# Altium schematic symbol library GSD9605YB-3V2800.SCHLIB: 1 symbol
Pins are listed as number, name and electrical type; pins without a type are passive.

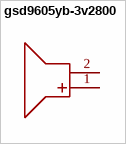
[diagram p0: symbol gsd9605yb-3v2800]

## gsd9605yb-3v2800
designator BUZZER??  (value not drawn)
驱动方式:有源(内含驱动线路);构造类型:电磁式;额定电压:3.3V;频率:2.7kHz;声压(SPL):80dB;; Manufacturer: INGHAi(赢海); AddInBom: yes; ModelId: d9f071f9511e4f7795b1f85db8085480; ModelName: BUZ-SMD_L9.6-W9.6-H5.0; ModelTransform: 393.7,377.952,0,270,0,0,0,0,0; Voltage Rating: 3.3V; Voltage - Supply: 2V~5V; Value: 2.7kHz; Current Consumption: 30mA; Sound Pressure Level(SPL): 80dB; Symbol: GSD9605YB-3V2800; LCSC Part Name: 9.6*9.6*5mm电磁有源 3V; SupplierPart: C255327; ManufacturerPart: GSD9605YB-3V2800; Supplier Footprint: SMD,9.6x9.6mm; JLCPCB Part Class: Extended Part; Datasheet: https://item.szlcsc.com/datasheet/GSD9605YB-3V2800/249279.html; Supplier: LCSC; ConvertToPcb: yes; FootprintName: BUZ-SMD_GSD9605YB-3V2800; Driver Circuitry: 有源(内含驱动线路); Technology: 电磁式; Diameter(φD): -; Length: 9.6mm; Width: 9.6mm; Height: 5.2mm; Operating Temperature: -20℃~+70℃; Mounting Type: 贴片; Lead Pitch: -; Continuous Operating Time: -
footprint BUZ-SMD_GSD9605YB-3V2800
pins: 1 +, 2 -